# Altium schematic symbol library PrzetwornicaStepDOWN.SchLib: 1 symbol
Pins are listed as number, name and electrical type; pins without a type are passive.

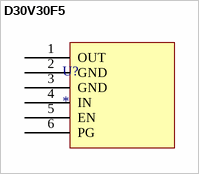
[diagram p0: symbol D30V30F5]

## D30V30F5
designator U?
footprint D30V30F5
pins: 1 OUT, 2 GND, 3 GND, 4 IN, 5 EN, 6 PG